# Altium schematic symbol library WE-SHCA.SchLib: 44 symbols
Pins are listed as number, name and electrical type; pins without a type are passive.

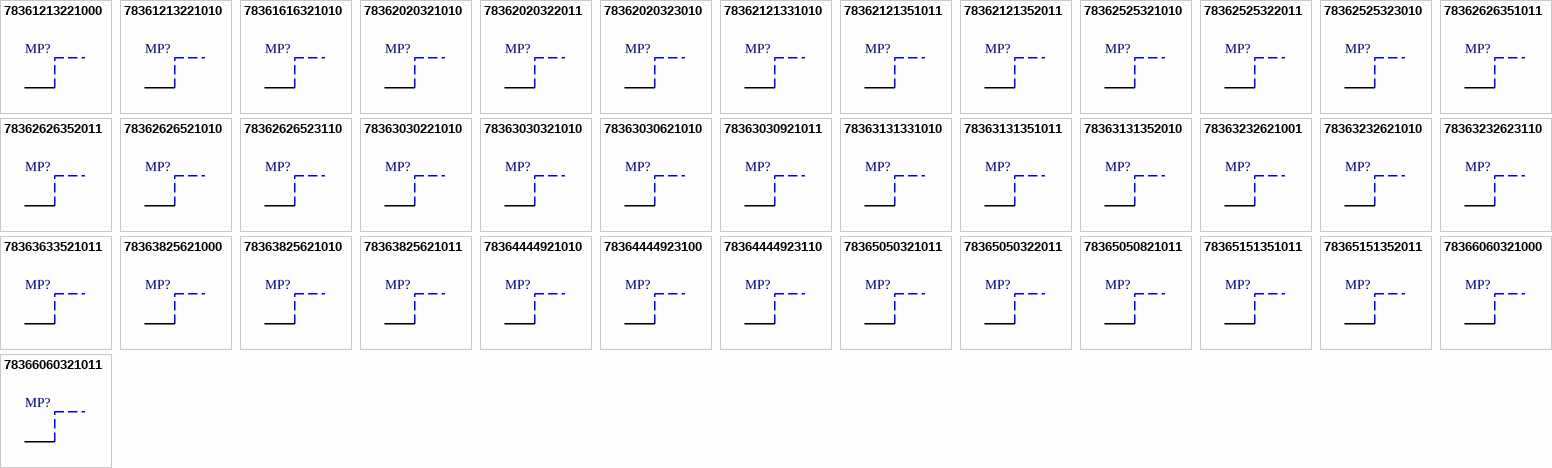
[diagram p0: symbols 78361213221000 to 78366060321011]

## 78361213221000
designator MP?  (value not drawn)
WE-SHCA Shielding Cabinet, SMT Frame, 12.7mm x 13.66mm x 2.54mm, Base Material = Nickel silver, Nickel Silver Plating; Manufacturer: Wurth Elektronik; Material Thickness: 0.2mm; Manufacturer Part Number: 78361213221000; Product Series: WE-SHCA; ComponentLink1Description: Website Link; ComponentLink1URL: https://www.we-online.com; ComponentLink2Description: Datasheet Link; ComponentLink2URL: https://www.we-online.com/components/products/datasheet/78361213221000; Mount: Surface Mount; Operating Temperature Min: -40degC; Operating Temperature Max: 125degC; Packaging: Tape and Reel; Length: 12.7mm; Width: 13.66mm; Height: 2.54mm; Automotive: Yes; Core Material: Nickel silver; Plating: Nickel Silver; Version: SMT Frame
footprint 78361213221000
pins: 1

## 78361213221010
designator MP?  (value not drawn)
WE-SHCA Shielding Cabinet, SMT Frame, 12.7mm x 13.66mm x 2.54mm, Base Material = Steel, Tin Plating; Manufacturer: Wurth Elektronik; Material Thickness: 0.2mm; Manufacturer Part Number: 78361213221010; Product Series: WE-SHCA; ComponentLink1Description: Website Link; ComponentLink1URL: https://www.we-online.com; ComponentLink2Description: Datasheet Link; ComponentLink2URL: https://www.we-online.com/components/products/datasheet/78361213221010; Mount: Surface Mount; Operating Temperature Min: -40degC; Operating Temperature Max: 125degC; Packaging: Tape and Reel; Length: 12.7mm; Width: 13.66mm; Height: 2.54mm; Automotive: Yes; Core Material: Steel; Plating: Tin; Version: SMT Frame
footprint 78361213221010
pins: 1

## 78361616321010
designator MP?  (value not drawn)
WE-SHCA Shielding Cabinet, SMT Frame, 16.5mm x 16.5mm x 3.6mm, Base Material = Steel, Tin Plating; Manufacturer: Wurth Elektronik; Material Thickness: 0.2mm; Manufacturer Part Number: 78361616321010; Product Series: WE-SHCA; ComponentLink1Description: Website Link; ComponentLink1URL: https://www.we-online.com; ComponentLink2Description: Datasheet Link; ComponentLink2URL: https://www.we-online.com/components/products/datasheet/78361616321010; Mount: Surface Mount; Operating Temperature Min: -40degC; Operating Temperature Max: 125degC; Packaging: Tape and Reel; Length: 16.5mm; Width: 16.5mm; Height: 3.6mm; Automotive: Yes; Core Material: Steel; Plating: Tin; Version: SMT Frame
footprint 78361616321010
pins: 1

## 78362020321010
designator MP?  (value not drawn)
WE-SHCA Shielding Cabinet, SMT Frame, 20.4mm x 20.4mm x 3.2mm, Base Material = Steel, Tin Plating; Manufacturer: Wurth Elektronik; Material Thickness: 0.2mm; Manufacturer Part Number: 78362020321010; Product Series: WE-SHCA; ComponentLink1Description: Website Link; ComponentLink1URL: https://www.we-online.com; ComponentLink2Description: Datasheet Link; ComponentLink2URL: https://www.we-online.com/components/products/datasheet/78362020321010; Mount: Surface Mount; Operating Temperature Min: -40degC; Operating Temperature Max: 125degC; Packaging: Tape and Reel; Length: 20.4mm; Width: 20.4mm; Height: 3.2mm; Automotive: Yes; Core Material: Steel; Plating: Tin; Version: SMT Frame
footprint 78362020321010
pins: 1

## 78362020322011
designator MP?  (value not drawn)
WE-SHCA Shielding Cabinet, THT Frame, 20.4mm x 20.4mm x 3.2mm, Base Material = Steel, Tin Plating; Manufacturer: Wurth Elektronik; Material Thickness: 0.2mm; Manufacturer Part Number: 78362020322011; Product Series: WE-SHCA; ComponentLink1Description: Website Link; ComponentLink1URL: https://www.we-online.com; ComponentLink2Description: Datasheet Link; ComponentLink2URL: https://www.we-online.com/components/products/datasheet/78362020322011; Mount: Through Hole; Operating Temperature Min: -40degC; Operating Temperature Max: 125degC; Packaging: Tray; Length: 20.4mm; Width: 20.4mm; Height: 3.2mm; Automotive: Yes; Core Material: Steel; Plating: Tin; Version: THT Frame
footprint 78362020322011
pins: 1

## 78362020323010
designator MP?  (value not drawn)
WE-SHCA Shielding Cabinet, One Piece, 20.4mm x 20.4mm x 3.2mm, Base Material = Steel, Tin Plating; Manufacturer: Wurth Elektronik; Material Thickness: 0.2mm; Manufacturer Part Number: 78362020323010; Product Series: WE-SHCA; ComponentLink1Description: Website Link; ComponentLink1URL: https://www.we-online.com; ComponentLink2Description: Datasheet Link; ComponentLink2URL: https://www.we-online.com/components/products/datasheet/78362020323010; Mount: Surface Mount; Operating Temperature Min: -40degC; Operating Temperature Max: 125degC; Packaging: Tape and Reel; Length: 20.4mm; Width: 20.4mm; Height: 3.2mm; Automotive: Yes; Core Material: Steel; Plating: Tin; Version: One Piece
footprint 78362020323010
pins: 1

## 78362121331010
designator MP?  (value not drawn)
WE-SHCA Shielding Cabinet, SMT Frame, 21mm x 21mm x 3.5mm, Base Material = Steel, Tin Plating; Manufacturer: Wurth Elektronik; Material Thickness: 0.5mm; Manufacturer Part Number: 78362121331010; Product Series: WE-SHCA; ComponentLink1Description: Website Link; ComponentLink1URL: https://www.we-online.com; ComponentLink2Description: Datasheet Link; ComponentLink2URL: https://www.we-online.com/components/products/datasheet/78362121331010; Mount: Surface Mount; Operating Temperature Min: -40degC; Operating Temperature Max: 125degC; Packaging: Tape and Reel; Length: 21mm; Width: 21mm; Height: 3.5mm; Automotive: Yes; Core Material: Steel; Plating: Tin; Version: SMT Frame
footprint 78362121331010
pins: 1

## 78362121351011
designator MP?  (value not drawn)
WE-SHCA Shielding Cabinet, SMT Frame, 21mm x 21mm x 3.5mm, Base Material = Steel, Tin Plating; Manufacturer: Wurth Elektronik; Material Thickness: 0.5mm; Manufacturer Part Number: 78362121351011; Product Series: WE-SHCA; ComponentLink1Description: Website Link; ComponentLink1URL: https://www.we-online.com; ComponentLink2Description: Datasheet Link; ComponentLink2URL: https://www.we-online.com/components/products/datasheet/78362121351011; Mount: Surface Mount; Operating Temperature Min: -40degC; Operating Temperature Max: 125degC; Packaging: Tray; Length: 21mm; Width: 21mm; Height: 3.5mm; Automotive: Yes; Core Material: Steel; Plating: Tin; Version: SMT Frame
footprint 78362121351011
pins: 1

## 78362121352011
designator MP?  (value not drawn)
WE-SHCA Shielding Cabinet, THT Frame, 21mm x 21mm x 3.5mm, Base Material = Steel, Tin Plating; Manufacturer: Wurth Elektronik; Material Thickness: 0.5mm; Manufacturer Part Number: 78362121352011; Product Series: WE-SHCA; ComponentLink1Description: Website Link; ComponentLink1URL: https://www.we-online.com; ComponentLink2Description: Datasheet Link; ComponentLink2URL: https://www.we-online.com/components/products/datasheet/78362121352011; Mount: Through Hole; Operating Temperature Min: -40degC; Operating Temperature Max: 125degC; Packaging: Tray; Length: 21mm; Width: 21mm; Height: 3.5mm; Automotive: Yes; Core Material: Steel; Plating: Tin; Version: THT Frame
footprint 78362121352011
pins: 1

## 78362525321010
designator MP?  (value not drawn)
WE-SHCA Shielding Cabinet, SMT Frame, 25.4mm x 25.4mm x 3.2mm, Base Material = Steel, Tin Plating; Manufacturer: Wurth Elektronik; Material Thickness: 0.2mm; Manufacturer Part Number: 78362525321010; Product Series: WE-SHCA; ComponentLink1Description: Website Link; ComponentLink1URL: https://www.we-online.com; ComponentLink2Description: Datasheet Link; ComponentLink2URL: https://www.we-online.com/components/products/datasheet/78362525321010; Mount: Surface Mount; Operating Temperature Min: -40degC; Operating Temperature Max: 125degC; Packaging: Tape and Reel; Length: 25.4mm; Width: 25.4mm; Height: 3.2mm; Automotive: Yes; Core Material: Steel; Plating: Tin; Version: SMT Frame
footprint 78362525321010
pins: 1

## 78362525322011
designator MP?  (value not drawn)
WE-SHCA Shielding Cabinet, THT Frame, 25.4mm x 25.4mm x 3.2mm, Base Material = Steel, Tin Plating; Manufacturer: Wurth Elektronik; Material Thickness: 0.2mm; Manufacturer Part Number: 78362525322011; Product Series: WE-SHCA; ComponentLink1Description: Website Link; ComponentLink1URL: https://www.we-online.com; ComponentLink2Description: Datasheet Link; ComponentLink2URL: https://www.we-online.com/components/products/datasheet/78362525322011; Mount: Through Hole; Operating Temperature Min: -40degC; Operating Temperature Max: 125degC; Packaging: Tray; Length: 25.4mm; Width: 25.4mm; Height: 3.2mm; Automotive: Yes; Core Material: Steel; Plating: Tin; Version: THT Frame
footprint 78362525322011
pins: 1

## 78362525323010
designator MP?  (value not drawn)
WE-SHCA Shielding Cabinet, One Piece, 25.4mm x 25.4mm x 3.2mm, Base Material = Steel, Tin Plating; Manufacturer: Wurth Elektronik; Material Thickness: 0.2mm; Manufacturer Part Number: 78362525323010; Product Series: WE-SHCA; ComponentLink1Description: Website Link; ComponentLink1URL: https://www.we-online.com; ComponentLink2Description: Datasheet Link; ComponentLink2URL: https://www.we-online.com/components/products/datasheet/78362525323010; Mount: Surface Mount; Operating Temperature Min: -40degC; Operating Temperature Max: 125degC; Packaging: Tape and Reel; Length: 25.4mm; Width: 25.4mm; Height: 3.2mm; Automotive: Yes; Core Material: Steel; Plating: Tin; Version: One Piece
footprint 78362525323010
pins: 1

## 78362626351011
designator MP?  (value not drawn)
WE-SHCA Shielding Cabinet, SMT Frame, 26mm x 26mm x 3.5mm, Base Material = Steel, Tin Plating; Manufacturer: Wurth Elektronik; Material Thickness: 0.5mm; Manufacturer Part Number: 78362626351011; Product Series: WE-SHCA; ComponentLink1Description: Website Link; ComponentLink1URL: https://www.we-online.com; ComponentLink2Description: Datasheet Link; ComponentLink2URL: https://www.we-online.com/components/products/datasheet/78362626351011; Mount: Surface Mount; Operating Temperature Min: -40degC; Operating Temperature Max: 125degC; Packaging: Tape and Reel; Length: 26mm; Width: 26mm; Height: 3.5mm; Automotive: Yes; Core Material: Steel; Plating: Tin; Version: SMT Frame
footprint 78362626351011
pins: 1

## 78362626352011
designator MP?  (value not drawn)
WE-SHCA Shielding Cabinet, THT Frame, 26mm x 26mm x 3.5mm, Base Material = Steel, Tin Plating; Manufacturer: Wurth Elektronik; Material Thickness: 0.5mm; Manufacturer Part Number: 78362626352011; Product Series: WE-SHCA; ComponentLink1Description: Website Link; ComponentLink1URL: https://www.we-online.com; ComponentLink2Description: Datasheet Link; ComponentLink2URL: https://www.we-online.com/components/products/datasheet/78362626352011; Mount: Through Hole; Operating Temperature Min: -40degC; Operating Temperature Max: 125degC; Packaging: Tray; Length: 26mm; Width: 26mm; Height: 3.5mm; Automotive: Yes; Core Material: Steel; Plating: Tin; Version: THT Frame
footprint 78362626352011
pins: 1

## 78362626521010
designator MP?  (value not drawn)
WE-SHCA Shielding Cabinet, SMT Frame, 26.21mm x 26.21mm x 5.08mm, Base Material = Steel, Tin Plating; Manufacturer: Wurth Elektronik; Material Thickness: 0.2mm; Manufacturer Part Number: 78362626521010; Product Series: WE-SHCA; ComponentLink1Description: Website Link; ComponentLink1URL: https://www.we-online.com; ComponentLink2Description: Datasheet Link; ComponentLink2URL: https://www.we-online.com/components/products/datasheet/78362626521010; Mount: Surface Mount; Operating Temperature Min: -40degC; Operating Temperature Max: 125degC; Packaging: Tape and Reel; Length: 26.21mm; Width: 26.21mm; Height: 5.08mm; Automotive: Yes; Core Material: Steel; Plating: Tin; Version: SMT Frame
footprint 78362626521010
pins: 1

## 78362626523110
designator MP?  (value not drawn)
WE-SHCA Shielding Cabinet, One Piece, 26.21mm x 26.21mm x 5.08mm, Base Material = Steel, Tin Plating; Manufacturer: Wurth Elektronik; Material Thickness: 0.2mm; Manufacturer Part Number: 78362626523110; Product Series: WE-SHCA; ComponentLink1Description: Website Link; ComponentLink1URL: https://www.we-online.com; ComponentLink2Description: Datasheet Link; ComponentLink2URL: https://www.we-online.com/components/products/datasheet/78362626523110; Mount: Surface Mount; Operating Temperature Min: -40degC; Operating Temperature Max: 125degC; Packaging: Tape and Reel; Length: 26.21mm; Width: 26.21mm; Height: 5.08mm; Automotive: Yes; Core Material: Steel; Plating: Tin; Version: One Piece
footprint 78362626523110
pins: 1

## 78363030221010
designator MP?  (value not drawn)
WE-SHCA Shielding Cabinet, SMT Frame, 30.4mm x 30.4mm x 2.3mm, Base Material = Steel, Tin Plating; Manufacturer: Wurth Elektronik; Material Thickness: 0.2mm; Manufacturer Part Number: 78363030221010; Product Series: WE-SHCA; ComponentLink1Description: Website Link; ComponentLink1URL: https://www.we-online.com; ComponentLink2Description: Datasheet Link; ComponentLink2URL: https://www.we-online.com/components/products/datasheet/78363030221010; Mount: Surface Mount; Operating Temperature Min: -40degC; Operating Temperature Max: 125degC; Packaging: Tape and Reel; Length: 30.4mm; Width: 30.4mm; Height: 2.3mm; Automotive: Yes; Core Material: Steel; Plating: Tin; Version: SMT Frame
footprint 78363030221010
pins: 1

## 78363030321010
designator MP?  (value not drawn)
WE-SHCA Shielding Cabinet, SMT Frame, 30.4mm x 30.4mm x 3.2mm, Base Material = Steel, Tin Plating; Manufacturer: Wurth Elektronik; Material Thickness: 0.2mm; Manufacturer Part Number: 78363030321010; Product Series: WE-SHCA; ComponentLink1Description: Website Link; ComponentLink1URL: https://www.we-online.com; ComponentLink2Description: Datasheet Link; ComponentLink2URL: https://www.we-online.com/components/products/datasheet/78363030321010; Mount: Surface Mount; Operating Temperature Min: -40degC; Operating Temperature Max: 125degC; Packaging: Tape and Reel; Length: 30.4mm; Width: 30.4mm; Height: 3.2mm; Automotive: Yes; Core Material: Steel; Plating: Tin; Version: SMT Frame
footprint 78363030321010
pins: 1

## 78363030621010
designator MP?  (value not drawn)
WE-SHCA Shielding Cabinet, SMT Frame, 30.4mm x 30.4mm x 6mm, Base Material = Steel, Tin Plating; Manufacturer: Wurth Elektronik; Material Thickness: 0.2mm; Manufacturer Part Number: 78363030621010; Product Series: WE-SHCA; ComponentLink1Description: Website Link; ComponentLink1URL: https://www.we-online.com; ComponentLink2Description: Datasheet Link; ComponentLink2URL: https://www.we-online.com/components/products/datasheet/78363030621010; Mount: Surface Mount; Operating Temperature Min: -40degC; Operating Temperature Max: 125degC; Packaging: Tape and Reel; Length: 30.4mm; Width: 30.4mm; Height: 6mm; Automotive: Yes; Core Material: Steel; Plating: Tin; Version: SMT Frame
footprint 78363030621010
pins: 1

## 78363030921011
designator MP?  (value not drawn)
WE-SHCA Shielding Cabinet, SMT Frame, 30.4mm x 30.4mm x 9mm, Base Material = Steel, Tin Plating; Manufacturer: Wurth Elektronik; Material Thickness: 0.2mm; Manufacturer Part Number: 78363030921011; Product Series: WE-SHCA; ComponentLink1Description: Website Link; ComponentLink1URL: https://www.we-online.com; ComponentLink2Description: Datasheet Link; ComponentLink2URL: https://www.we-online.com/components/products/datasheet/78363030921011; Mount: Surface Mount; Operating Temperature Min: -40degC; Operating Temperature Max: 125degC; Packaging: Tray; Length: 30.4mm; Width: 30.4mm; Height: 9mm; Automotive: Yes; Core Material: Steel; Plating: Tin; Version: SMT Frame
footprint 78363030921011
pins: 1

## 78363131331010
designator MP?  (value not drawn)
WE-SHCA Shielding Cabinet, SMT Frame, 31mm x 31mm x 3.5mm, Base Material = Steel, Tin Plating; Manufacturer: Wurth Elektronik; Material Thickness: 0.5mm; Manufacturer Part Number: 78363131331010; Product Series: WE-SHCA; ComponentLink1Description: Website Link; ComponentLink1URL: https://www.we-online.com; ComponentLink2Description: Datasheet Link; ComponentLink2URL: https://www.we-online.com/components/products/datasheet/78363131331010; Mount: Surface Mount; Operating Temperature Min: -40degC; Operating Temperature Max: 125degC; Packaging: Tape and Reel; Length: 31mm; Width: 31mm; Height: 3.5mm; Automotive: Yes; Core Material: Steel; Plating: Tin; Version: SMT Frame
footprint 78363131331010
pins: 1

## 78363131351011
designator MP?  (value not drawn)
WE-SHCA Shielding Cabinet, SMT Frame, 31mm x 31mm x 3.5mm, Base Material = Steel, Tin Plating; Manufacturer: Wurth Elektronik; Material Thickness: 0.5mm; Manufacturer Part Number: 78363131351011; Product Series: WE-SHCA; ComponentLink1Description: Website Link; ComponentLink1URL: https://www.we-online.com; ComponentLink2Description: Datasheet Link; ComponentLink2URL: https://www.we-online.com/components/products/datasheet/78363131351011; Mount: Surface Mount; Operating Temperature Min: -40degC; Operating Temperature Max: 125degC; Packaging: Tray; Length: 31mm; Width: 31mm; Height: 3.5mm; Automotive: Yes; Core Material: Steel; Plating: Tin; Version: SMT Frame
footprint 78363131351011
pins: 1

## 78363131352010
designator MP?  (value not drawn)
WE-SHCA Shielding Cabinet, THT Frame, 31mm x 31mm x 3.5mm, Base Material = Steel, Tin Plating; Manufacturer: Wurth Elektronik; Material Thickness: 0.5mm; Manufacturer Part Number: 78363131352010; Product Series: WE-SHCA; ComponentLink1Description: Website Link; ComponentLink1URL: https://www.we-online.com; ComponentLink2Description: Datasheet Link; ComponentLink2URL: https://www.we-online.com/components/products/datasheet/78363131352010; Mount: Through Hole; Operating Temperature Min: -40degC; Operating Temperature Max: 125degC; Packaging: Tape and Reel; Length: 31mm; Width: 31mm; Height: 3.5mm; Automotive: Yes; Core Material: Steel; Plating: Tin; Version: THT Frame
footprint 78363131352010
pins: 1

## 78363232621001
designator MP?  (value not drawn)
WE-SHCA Shielding Cabinet, SMT Frame, 32mm x 32mm x 6mm, Base Material = Nickel silver, Nickel Silver Plating; Manufacturer: Wurth Elektronik; Material Thickness: 0.2mm; Manufacturer Part Number: 78363232621001; Product Series: WE-SHCA; ComponentLink1Description: Website Link; ComponentLink1URL: https://www.we-online.com; ComponentLink2Description: Datasheet Link; ComponentLink2URL: https://www.we-online.com/components/products/datasheet/78363232621001; Mount: Surface Mount; Operating Temperature Min: -40degC; Operating Temperature Max: 125degC; Packaging: Tape and Reel; Length: 32mm; Width: 32mm; Height: 6mm; Automotive: Yes; Core Material: Nickel silver; Plating: Nickel Silver; Version: SMT Frame
footprint 78363232621001
pins: 1

## 78363232621010
designator MP?  (value not drawn)
WE-SHCA Shielding Cabinet, SMT Frame, 32mm x 32mm x 6mm, Base Material = Steel, Tin Plating; Manufacturer: Wurth Elektronik; Material Thickness: 0.2mm; Manufacturer Part Number: 78363232621010; Product Series: WE-SHCA; ComponentLink1Description: Website Link; ComponentLink1URL: https://www.we-online.com; ComponentLink2Description: Datasheet Link; ComponentLink2URL: https://www.we-online.com/components/products/datasheet/78363232621010; Mount: Surface Mount; Operating Temperature Min: -40degC; Operating Temperature Max: 125degC; Packaging: Tape and Reel; Length: 32mm; Width: 32mm; Height: 6mm; Automotive: Yes; Core Material: Steel; Plating: Tin; Version: SMT Frame
footprint 78363232621010
pins: 1

## 78363232623110
designator MP?  (value not drawn)
WE-SHCA Shielding Cabinet, One Piece, 32mm x 32mm x 6mm, Base Material = Steel, Tin Plating; Manufacturer: Wurth Elektronik; Material Thickness: 0.2mm; Manufacturer Part Number: 78363232623110; Product Series: WE-SHCA; ComponentLink1Description: Website Link; ComponentLink1URL: https://www.we-online.com; ComponentLink2Description: Datasheet Link; ComponentLink2URL: https://www.we-online.com/components/products/datasheet/78363232623110; Mount: Surface Mount; Operating Temperature Min: -40degC; Operating Temperature Max: 125degC; Packaging: Tape and Reel; Length: 32mm; Width: 32mm; Height: 6mm; Automotive: Yes; Core Material: Steel; Plating: Tin; Version: One Piece
footprint 78363232623110
pins: 1

## 78363633521011
designator MP?  (value not drawn)
WE-SHCA Shielding Cabinet, SMT Frame, 36.83mm x 33.68mm x 5.08mm, Base Material = Steel, Tin Plating; Manufacturer: Wurth Elektronik; Material Thickness: 0.2mm; Manufacturer Part Number: 78363633521011; Product Series: WE-SHCA; ComponentLink1Description: Website Link; ComponentLink1URL: https://www.we-online.com; ComponentLink2Description: Datasheet Link; ComponentLink2URL: https://www.we-online.com/components/products/datasheet/78363633521011; Mount: Surface Mount; Operating Temperature Min: -40degC; Operating Temperature Max: 125degC; Packaging: Tray; Length: 36.83mm; Width: 33.68mm; Height: 5.08mm; Automotive: Yes; Core Material: Steel; Plating: Tin; Version: SMT Frame
footprint 78363633521011
pins: 1

## 78363825621000
designator MP?  (value not drawn)
WE-SHCA Shielding Cabinet, SMT Frame, 38.1mm x 25.4mm x 6mm, Base Material = Nickel silver, Nickel Silver Plating; Manufacturer: Wurth Elektronik; Material Thickness: 0.2mm; Manufacturer Part Number: 78363825621000; Product Series: WE-SHCA; ComponentLink1Description: Website Link; ComponentLink1URL: https://www.we-online.com; ComponentLink2Description: Datasheet Link; ComponentLink2URL: https://www.we-online.com/components/products/datasheet/78363825621000; Mount: Surface Mount; Operating Temperature Min: -40degC; Operating Temperature Max: 125degC; Packaging: Tape and Reel; Length: 38.1mm; Width: 25.4mm; Height: 6mm; Automotive: Yes; Core Material: Nickel silver; Plating: Nickel Silver; Version: SMT Frame
footprint 78363825621000
pins: 1

## 78363825621010
designator MP?  (value not drawn)
WE-SHCA Shielding Cabinet, SMT Frame, 38.1mm x 25.4mm x 6mm, Base Material = Steel, Tin Plating; Manufacturer: Wurth Elektronik; Material Thickness: 0.2mm; Manufacturer Part Number: 78363825621010; Product Series: WE-SHCA; ComponentLink1Description: Website Link; ComponentLink1URL: https://www.we-online.com; ComponentLink2Description: Datasheet Link; ComponentLink2URL: https://www.we-online.com/components/products/datasheet/78363825621010; Mount: Surface Mount; Operating Temperature Min: -40degC; Operating Temperature Max: 125degC; Packaging: Tape and Reel; Length: 38.1mm; Width: 25.4mm; Height: 6mm; Automotive: Yes; Core Material: Steel; Plating: Tin; Version: SMT Frame
footprint 78363825621010
pins: 1

## 78363825621011
designator MP?  (value not drawn)
WE-SHCA Shielding Cabinet, SMT Frame, 38.1mm x 25.4mm x 6mm, Base Material = Steel, Tin Plating; Manufacturer: Wurth Elektronik; Material Thickness: 0.2mm; Manufacturer Part Number: 78363825621011; Product Series: WE-SHCA; ComponentLink1Description: Website Link; ComponentLink1URL: https://www.we-online.com; ComponentLink2Description: Datasheet Link; ComponentLink2URL: https://www.we-online.com/components/products/datasheet/78363825621011; Mount: Surface Mount; Operating Temperature Min: -40degC; Operating Temperature Max: 125degC; Packaging: Tray; Length: 38.1mm; Width: 25.4mm; Height: 6mm; Automotive: Yes; Core Material: Steel; Plating: Tin; Version: SMT Frame
footprint 78363825621011
pins: 1

## 78364444921010
designator MP?  (value not drawn)
WE-SHCA Shielding Cabinet, SMT Frame, 44.37mm x 44.37mm x 9.75mm, Base Material = Steel, Tin Plating; Manufacturer: Wurth Elektronik; Material Thickness: 0.2mm; Manufacturer Part Number: 78364444921010; Product Series: WE-SHCA; ComponentLink1Description: Website Link; ComponentLink1URL: https://www.we-online.com; ComponentLink2Description: Datasheet Link; ComponentLink2URL: https://www.we-online.com/components/products/datasheet/78364444921010; Mount: Surface Mount; Operating Temperature Min: -40degC; Operating Temperature Max: 125degC; Packaging: Tape and Reel; Length: 44.37mm; Width: 44.37mm; Height: 9.75mm; Automotive: Yes; Core Material: Steel; Plating: Tin; Version: SMT Frame
footprint 78364444921010
pins: 1

## 78364444923100
designator MP?  (value not drawn)
WE-SHCA Shielding Cabinet, One Piece, 44.37mm x 44.37mm x 9.75mm, Base Material = Nickel silver, Nickel Silver Plating; Manufacturer: Wurth Elektronik; Material Thickness: 0.2mm; Manufacturer Part Number: 78364444923100; Product Series: WE-SHCA; ComponentLink1Description: Website Link; ComponentLink1URL: https://www.we-online.com; ComponentLink2Description: Datasheet Link; ComponentLink2URL: https://www.we-online.com/components/products/datasheet/78364444923100; Mount: Surface Mount; Operating Temperature Min: -40degC; Operating Temperature Max: 125degC; Packaging: Tape and Reel; Length: 44.37mm; Width: 44.37mm; Height: 9.75mm; Automotive: Yes; Core Material: Nickel silver; Plating: Nickel Silver; Version: One Piece
footprint 78364444923100
pins: 1

## 78364444923110
designator MP?  (value not drawn)
WE-SHCA Shielding Cabinet, One Piece, 44.37mm x 44.37mm x 9.75mm, Base Material = Steel, Tin Plating; Manufacturer: Wurth Elektronik; Material Thickness: 0.2mm; Manufacturer Part Number: 78364444923110; Product Series: WE-SHCA; ComponentLink1Description: Website Link; ComponentLink1URL: https://www.we-online.com; ComponentLink2Description: Datasheet Link; ComponentLink2URL: https://www.we-online.com/components/products/datasheet/78364444923110; Mount: Surface Mount; Operating Temperature Min: -40degC; Operating Temperature Max: 125degC; Packaging: Tape and Reel; Length: 44.37mm; Width: 44.37mm; Height: 9.75mm; Automotive: Yes; Core Material: Steel; Plating: Tin; Version: One Piece
footprint 78364444923110
pins: 1

## 78365050321011
designator MP?  (value not drawn)
WE-SHCA Shielding Cabinet, SMT Frame, 50.4mm x 50.4mm x 3.2mm, Base Material = Steel, Tin Plating; Manufacturer: Wurth Elektronik; Material Thickness: 0.2mm; Manufacturer Part Number: 78365050321011; Product Series: WE-SHCA; ComponentLink1Description: Website Link; ComponentLink1URL: https://www.we-online.com; ComponentLink2Description: Datasheet Link; ComponentLink2URL: https://www.we-online.com/components/products/datasheet/78365050321011; Mount: Surface Mount; Operating Temperature Min: -40degC; Operating Temperature Max: 125degC; Packaging: Tray; Length: 50.4mm; Width: 50.4mm; Height: 3.2mm; Automotive: Yes; Core Material: Steel; Plating: Tin; Version: SMT Frame
footprint 78365050321011
pins: 1

## 78365050322011
designator MP?  (value not drawn)
WE-SHCA Shielding Cabinet, THT Frame, 50.4mm x 50.4mm x 3.2mm, Base Material = Steel, Tin Plating; Manufacturer: Wurth Elektronik; Material Thickness: 0.2mm; Manufacturer Part Number: 78365050322011; Product Series: WE-SHCA; ComponentLink1Description: Website Link; ComponentLink1URL: https://www.we-online.com; ComponentLink2Description: Datasheet Link; ComponentLink2URL: https://www.we-online.com/components/products/datasheet/78365050322011; Mount: Through Hole; Operating Temperature Min: -40degC; Operating Temperature Max: 125degC; Packaging: Tray; Length: 50.4mm; Width: 50.4mm; Height: 3.2mm; Automotive: Yes; Core Material: Steel; Plating: Tin; Version: THT Frame
footprint 78365050322011
pins: 1

## 78365050821011
designator MP?  (value not drawn)
WE-SHCA Shielding Cabinet, SMT Frame, 50.4mm x 50.4mm x 8mm, Base Material = Steel, Tin Plating; Manufacturer: Wurth Elektronik; Material Thickness: 0.2mm; Manufacturer Part Number: 78365050821011; Product Series: WE-SHCA; ComponentLink1Description: Website Link; ComponentLink1URL: https://www.we-online.com; ComponentLink2Description: Datasheet Link; ComponentLink2URL: https://www.we-online.com/components/products/datasheet/78365050821011; Mount: Surface Mount; Operating Temperature Min: -40degC; Operating Temperature Max: 125degC; Packaging: Tray; Length: 50.4mm; Width: 50.4mm; Height: 8mm; Automotive: Yes; Core Material: Steel; Plating: Tin; Version: SMT Frame
footprint 78365050821011
pins: 1

## 78365151351011
designator MP?  (value not drawn)
WE-SHCA Shielding Cabinet, SMT Frame, 51mm x 51mm x 3.5mm, Base Material = Steel, Tin Plating; Manufacturer: Wurth Elektronik; Material Thickness: 0.5mm; Manufacturer Part Number: 78365151351011; Product Series: WE-SHCA; ComponentLink1Description: Website Link; ComponentLink1URL: https://www.we-online.com; ComponentLink2Description: Datasheet Link; ComponentLink2URL: https://www.we-online.com/components/products/datasheet/78365151351011; Mount: Surface Mount; Operating Temperature Min: -40degC; Operating Temperature Max: 125degC; Packaging: Tray; Length: 51mm; Width: 51mm; Height: 3.5mm; Automotive: Yes; Core Material: Steel; Plating: Tin; Version: SMT Frame
footprint 78365151351011
pins: 1

## 78365151352011
designator MP?  (value not drawn)
WE-SHCA Shielding Cabinet, THT Frame, 51mm x 51mm x 3.5mm, Base Material = Steel, Tin Plating; Manufacturer: Wurth Elektronik; Material Thickness: 0.5mm; Manufacturer Part Number: 78365151352011; Product Series: WE-SHCA; ComponentLink1Description: Website Link; ComponentLink1URL: https://www.we-online.com; ComponentLink2Description: Datasheet Link; ComponentLink2URL: https://www.we-online.com/components/products/datasheet/78365151352011; Mount: Through Hole; Operating Temperature Min: -40degC; Operating Temperature Max: 125degC; Packaging: Tray; Length: 51mm; Width: 51mm; Height: 3.5mm; Automotive: Yes; Core Material: Steel; Plating: Tin; Version: THT Frame
footprint 78365151352011
pins: 1

## 78366060321000
designator MP?  (value not drawn)
WE-SHCA Shielding Cabinet, SMT Frame, 60.4mm x 60.4mm x 3.2mm, Base Material = Nickel silver, Nickel Silver Plating; Manufacturer: Wurth Elektronik; Material Thickness: 0.2mm; Manufacturer Part Number: 78366060321000; Product Series: WE-SHCA; ComponentLink1Description: Website Link; ComponentLink1URL: https://www.we-online.com; ComponentLink2Description: Datasheet Link; ComponentLink2URL: https://www.we-online.com/components/products/datasheet/78366060321000; Mount: Surface Mount; Operating Temperature Min: -40degC; Operating Temperature Max: 125degC; Packaging: Tape and Reel; Length: 60.4mm; Width: 60.4mm; Height: 3.2mm; Automotive: Yes; Core Material: Nickel silver; Plating: Nickel Silver; Version: SMT Frame
footprint 78366060321000
pins: 1

## 78366060321011
designator MP?  (value not drawn)
WE-SHCA Shielding Cabinet, SMT Frame, 60.4mm x 60.4mm x 3.2mm, Base Material = Steel, Tin Plating; Manufacturer: Wurth Elektronik; Material Thickness: 0.2mm; Manufacturer Part Number: 78366060321011; Product Series: WE-SHCA; ComponentLink1Description: Website Link; ComponentLink1URL: https://www.we-online.com; ComponentLink2Description: Datasheet Link; ComponentLink2URL: https://www.we-online.com/components/products/datasheet/78366060321011; Mount: Surface Mount; Operating Temperature Min: -40degC; Operating Temperature Max: 125degC; Packaging: Tray; Length: 60.4mm; Width: 60.4mm; Height: 3.2mm; Automotive: Yes; Core Material: Steel; Plating: Tin; Version: SMT Frame
footprint 78366060321011
pins: 1

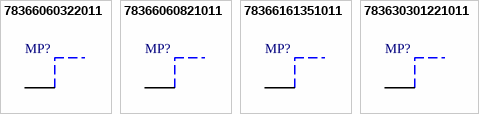
[diagram p1: symbols 78366060322011 to 783630301221011]

## 78366060322011
designator MP?  (value not drawn)
WE-SHCA Shielding Cabinet, THT Frame, 60.4mm x 60.4mm x 3.2mm, Base Material = Steel, Tin Plating; Manufacturer: Wurth Elektronik; Material Thickness: 0.2mm; Manufacturer Part Number: 78366060322011; Product Series: WE-SHCA; ComponentLink1Description: Website Link; ComponentLink1URL: https://www.we-online.com; ComponentLink2Description: Datasheet Link; ComponentLink2URL: https://www.we-online.com/components/products/datasheet/78366060322011; Mount: Through Hole; Operating Temperature Min: -40degC; Operating Temperature Max: 125degC; Packaging: Tray; Length: 60.4mm; Width: 60.4mm; Height: 3.2mm; Automotive: Yes; Core Material: Steel; Plating: Tin; Version: THT Frame
footprint 78366060322011
pins: 1

## 78366060821011
designator MP?  (value not drawn)
WE-SHCA Shielding Cabinet, SMT Frame, 60.4mm x 60.4mm x 8mm, Base Material = Steel, Tin Plating; Manufacturer: Wurth Elektronik; Material Thickness: 0.2mm; Manufacturer Part Number: 78366060821011; Product Series: WE-SHCA; ComponentLink1Description: Website Link; ComponentLink1URL: https://www.we-online.com; ComponentLink2Description: Datasheet Link; ComponentLink2URL: https://www.we-online.com/components/products/datasheet/78366060821011; Mount: Surface Mount; Operating Temperature Min: -40degC; Operating Temperature Max: 125degC; Packaging: Tray; Length: 60.4mm; Width: 60.4mm; Height: 8mm; Automotive: Yes; Core Material: Steel; Plating: Tin; Version: SMT Frame
footprint 78366060821011
pins: 1

## 78366161351011
designator MP?  (value not drawn)
WE-SHCA Shielding Cabinet, SMT Frame, 61mm x 61mm x 3.5mm, Base Material = Steel, Tin Plating; Manufacturer: Wurth Elektronik; Material Thickness: 0.5mm; Manufacturer Part Number: 78366161351011; Product Series: WE-SHCA; ComponentLink1Description: Website Link; ComponentLink1URL: https://www.we-online.com; ComponentLink2Description: Datasheet Link; ComponentLink2URL: https://www.we-online.com/components/products/datasheet/78366161351011; Mount: Surface Mount; Operating Temperature Min: -40degC; Operating Temperature Max: 125degC; Packaging: Tray; Length: 61mm; Width: 61mm; Height: 3.5mm; Automotive: Yes; Core Material: Steel; Plating: Tin; Version: SMT Frame
footprint 78366161351011
pins: 1

## 783630301221011
designator MP?  (value not drawn)
WE-SHCA Shielding Cabinet, SMT Frame, 30.4mm x 30.4mm x 12mm, Base Material = Steel, Tin Plating; Manufacturer: Wurth Elektronik; Material Thickness: 0.2mm; Manufacturer Part Number: 783630301221011; Product Series: WE-SHCA; ComponentLink1Description: Website Link; ComponentLink1URL: https://www.we-online.com; ComponentLink2Description: Datasheet Link; ComponentLink2URL: https://www.we-online.com/components/products/datasheet/783630301221011; Mount: Surface Mount; Operating Temperature Min: -40degC; Operating Temperature Max: 125degC; Packaging: Tray; Length: 30.4mm; Width: 30.4mm; Height: 12mm; Automotive: Yes; Core Material: Steel; Plating: Tin; Version: SMT Frame
footprint 783630301221011
pins: 1